# Altium footprint library WE-HCIM.PcbLib: 7 footprints
Each footprint in its own frame and in the unit in brackets; x right, y up, seen from the top. Pads: shape width x height; smd on the part's side, far side on the other; paste and mask are expansions set on the pad; w line width, h text height; cw(c..) or ccw(c..) is an arc to the next point about the centre after c.
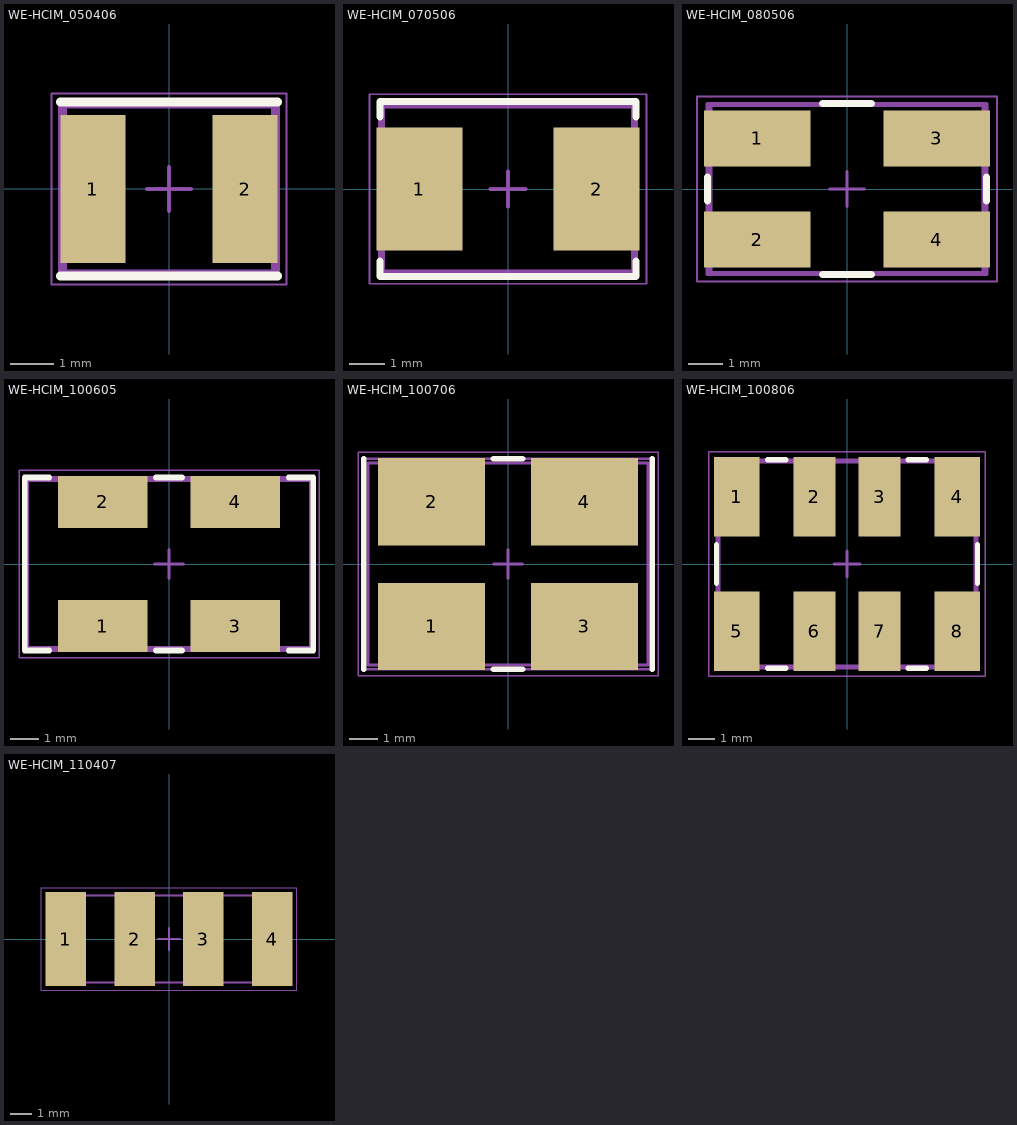
[diagram p0: the footprints below, top view; thin cyan lines are the x and y axes]

## WE-HCIM_050406 [mm]
height 5.8
pads (2):
  rect 1.5x3.4 smd: 1(-1.75,0) 2(1.75,0)
Top Overlay:
  lines w0.2: -2.5,-2 2.5,-2 ; -2.5,2 2.5,2
Top Assembly:
  lines w0.1: -2.5,-2 -2.5,2 2.5,2 2.5,-2 -2.5,-2
Top Designator:
  text ".Designator" at -3.647,-0.357 h1
Top 3D Body:
  lines w0.1: -2.4,-1.9 -2.4,1.9 2.4,1.9 2.4,-1.9 -2.4,-1.9
Top Courtyard:
  lines w0.05: -2.7,-2.2 -2.7,2.2 2.7,2.2 2.7,-2.2 -2.7,-2.2
Drill Drawing:
  lines w0.1: -0.5,0 0.5,0 ; 0,-0.5 0,0.5
Top Component Center:
  lines w0.1: -0.5,0 0.5,0 ; 0,-0.5 0,0.5
3D body "WE-HCIM_050406.stp": height 5.8, standoff 0, extent -2.4,-1.9 2.4,1.9

## WE-HCIM_070506 [mm]
height 5.8
pads (2):
  rect 2.45x3.5 smd: 1(-2.525,0) 2(2.525,0)
Top Overlay:
  lines w0.2: -3.65,-2.05 -3.65,-2.5 3.65,-2.5 3.65,-2.05 ; -3.65,2.05 -3.65,2.5 3.65,2.5 3.65,2.05
Top Assembly:
  lines w0.1: -3.65,-2.5 3.65,-2.5 3.65,2.5 -3.65,2.5 -3.65,-2.5
Top Designator:
  text ".Designator" at -3.647,-0.357 h1
Top 3D Body:
  lines w0.1: -3.55,-2.35 3.55,-2.35 3.55,2.35 -3.55,2.35 -3.55,-2.35
Top Courtyard:
  lines w0.05: -3.95,-2.7 3.95,-2.7 3.95,2.7 -3.95,2.7 -3.95,-2.7
Top Component Center:
  lines w0.1: -0.5,0 0.5,0 ; 0,-0.5 0,0.5
3D body "WE-HCIM_070506.stp": height 5.8, standoff 0, extent -3.55,-2.35 3.55,2.35

## WE-HCIM_080506 [mm]
height 5.8
pads (4):
  rect 3.05x1.6 smd: 1(-2.575,1.45) 2(-2.575,-1.45) 3(2.575,1.45) 4(2.575,-1.45)
Top Overlay:
  lines w0.2: -4,-0.35 -4,0.35 ; -0.7,-2.45 0.7,-2.45 ; -0.7,2.45 0.7,2.45 ; 4,-0.35 4,0.35
Top Assembly:
  lines w0.1: -4,-2.45 4,-2.45 4,2.45 -4,2.45 -4,-2.45
Top Designator:
  text ".Designator" at -3.647,-0.357 h1
Top 3D Body:
  lines w0.1: -3.9,-2.4 3.9,-2.4 3.9,2.4 -3.9,2.4 -3.9,-2.4
Top Courtyard:
  lines w0.05: -4.3,-2.65 4.3,-2.65 4.3,2.65 -4.3,2.65 -4.3,-2.65
Top Component Center:
  lines w0.1: -0.5,0 0.5,0 ; 0,-0.5 0,0.5
3D body "WE-HCIM_080506.stp": height 5.9, standoff 0.1, extent -3.9,-2.401 3.9,2.399

## WE-HCIM_100605 [mm]
height 4.8
pads (4):
  rect 3.1x1.8 smd: 1(-2.3,-2.15) 2(-2.3,2.15) 3(2.3,-2.15) 4(2.3,2.15)
Top Overlay:
  lines w0.2: -4.15,-3 -5,-3 -5,3 -4.15,3 ; -0.45,-3 0.45,-3 ; -0.45,3 0.45,3 ; 4.15,-3 5,-3 5,3 4.15,3
Top Assembly:
  lines w0.1: -5,-3 5,-3 5,3 -5,3 -5,-3
Top Designator:
  text ".Designator" at -3.647,-0.357 h1
Top 3D Body:
  lines w0.1: -4.9,-2.9 4.9,-2.9 4.9,2.9 -4.9,2.9 -4.9,-2.9
Top Courtyard:
  lines w0.05: -5.2,-3.25 5.2,-3.25 5.2,3.25 -5.2,3.25 -5.2,-3.25
Top Component Center:
  lines w0.1: -0.5,0 0.5,0 ; 0,-0.5 0,0.5
3D body "WE-HCIM_100605.stp": height 4.9, standoff 0.1, extent -4.9,-2.9 4.9,2.9

## WE-HCIM_100706 [mm]
height 5.7
pads (4):
  rect 3.7x3.025 smd: 1(-2.65,-2.163) 2(-2.65,2.163) 3(2.65,-2.163) 4(2.65,2.163)
Top Overlay:
  lines w0.2: -5,-3.65 -5,3.65 ; -0.5,-3.65 0.5,-3.65 ; -0.5,3.65 0.5,3.65 ; 5,-3.65 5,3.65
Top Assembly:
  lines w0.1: -5,-3.65 5,-3.65 5,3.65 -5,3.65 -5,-3.65
Top Designator:
  text ".Designator" at -3.647,-0.357 h1
Top 3D Body:
  lines w0.1: -4.85,-3.5 4.85,-3.5 4.85,3.5 -4.85,3.5 -4.85,-3.5
Top Courtyard:
  lines w0.05: -5.2,-3.875 5.2,-3.875 5.2,3.875 -5.2,3.875 -5.2,-3.875
Top Component Center:
  lines w0.1: -0.5,0 0.5,0 ; 0,-0.5 0,0.5
3D body "WE-HCIM_100706.stp": height 5.75, standoff 0.05, extent -4.85,-3.5 4.85,3.5

## WE-HCIM_100806 [mm]
height 5.8
pads (8):
  rect 1.75x3.05 smd: 1(-4.225,2.575) 4(4.225,2.575) 5(-4.225,-2.575) 8(4.225,-2.575)
  rect 1.6x3.05 smd: 2(-1.25,2.575) 3(1.25,2.575) 6(-1.25,-2.575) 7(1.25,-2.575)
Top Overlay:
  lines w0.2: -5,-0.75 -5,0.75 ; -3.05,-4 -2.35,-4 ; -3.05,4 -2.35,4 ; 2.35,-4 3.05,-4 ; 2.35,4 3.05,4 ; 5,-0.75 5,0.75
Top Assembly:
  lines w0.1: -5,-4 5,-4 5,4 -5,4 -5,-4
Top Designator:
  text ".Designator" at -3.647,-0.357 h1
Top 3D Body:
  lines w0.1: -4.9,-3.9 4.9,-3.9 4.9,3.9 -4.9,3.9 -4.9,-3.9
Top Courtyard:
  lines w0.05: -5.3,-4.3 5.3,-4.3 5.3,4.3 -5.3,4.3 -5.3,-4.3
Top Component Center:
  lines w0.1: -0.5,0 0.5,0 ; 0,-0.5 0,0.5
3D body "WE-HCIM_100806.stp": height 5.15, standoff 0.05, extent -4.9,-3.9 4.9,3.9

## WE-HCIM_110407 [mm]
height 7.3
pads (4):
  rect 1.85x4.3 smd: 1(-4.725,0) 2(-1.575,0) 3(1.575,0) 4(4.725,0)
Top Assembly:
  lines w0.1: -5.5,-2 -5.5,2 ; -5.5,-2 5.5,-2 ; -5.5,-2 -5.5,2 ; -5.5,-2 5.5,-2 ; -5.5,2 5.5,2 ; -5.5,2 5.5,2 ; 5.5,-2 5.5,2 ; 5.5,-2 5.5,2
Top Designator:
  text ".Designator" at -3.647,-0.357 h1
Top 3D Body:
  lines w0.1: -5.5,-2 -5.5,2 ; -5.5,-2 5.5,-2 ; -5.5,-2 -5.5,2 ; -5.5,-2 5.5,-2 ; -5.5,2 5.5,2 ; -5.5,2 5.5,2 ; 5.5,-2 5.5,2 ; 5.5,-2 5.5,2
Top Courtyard:
  lines w0.05: -5.85,-2.35 -5.85,2.35 5.85,2.35 5.85,-2.35 -5.85,-2.35
Top Component Center:
  lines w0.1: -0.5,0 0.5,0 ; 0,-0.5 0,0.5
3D body "WE-HCIM_110407.stp": height 7.2, standoff 0.1, extent -5.6,-2 5.4,2